# Altium footprint library custom-case.PcbLib: 483 footprints (part 2 of 31)
Each footprint in its own frame and in the unit in brackets; x right, y up, seen from the top. Pads: shape width x height; smd on the part's side, far side on the other; paste and mask are expansions set on the pad; w line width, h text height; cw(c..) or ccw(c..) is an arc to the next point about the centre after c.
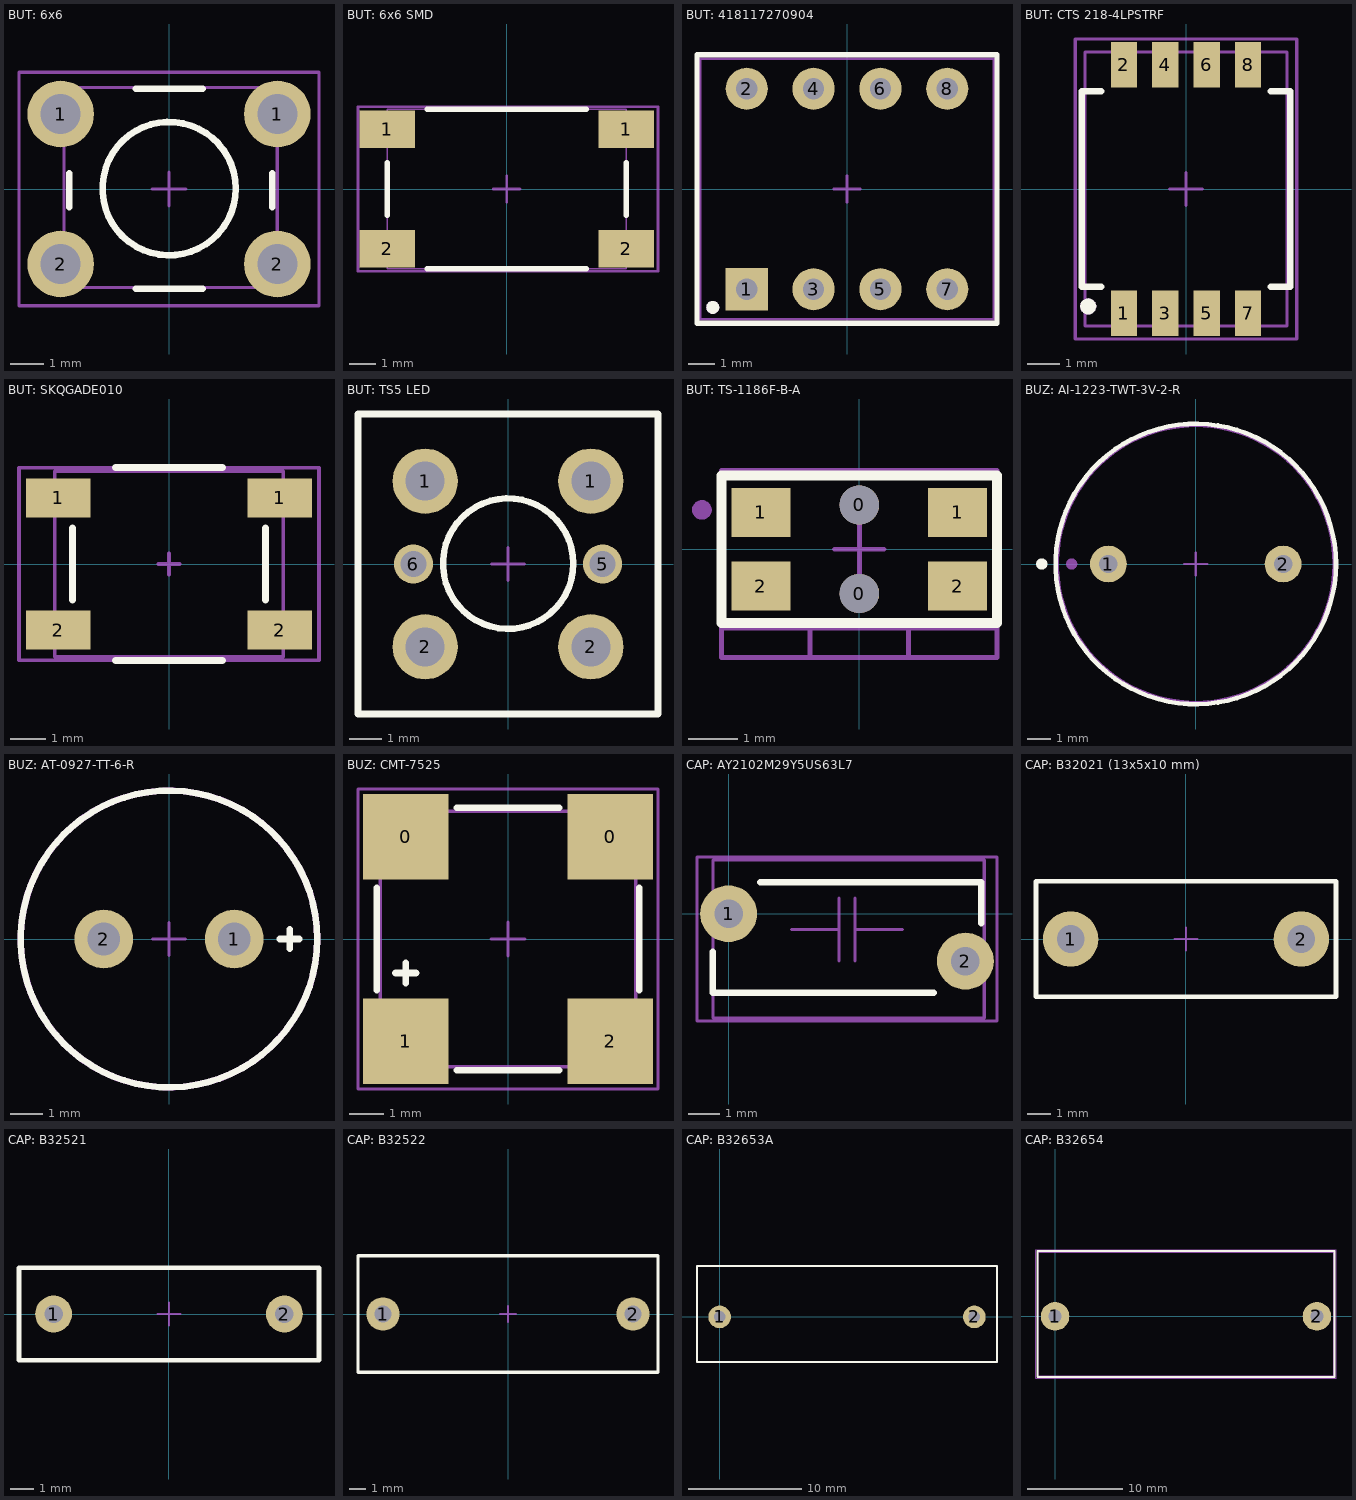
[diagram p1: the footprints below, top view; thin cyan lines are the x and y axes]

## BUT: 6x6 [mm] "Leaded Tactile Button 6x6"
height 5
pads (4):
  round 2 hole 1.2: 1(-3.25,2.25) 1(3.25,2.25) 2(-3.25,-2.25) 2(3.25,-2.25)
Top Overlay:
  circle w0.2: c0.004,0.012 r2
  lines w0.2: -2.996,-0.544 -2.996,0.472 ; -0.996,-2.988 1.004,-2.988 ; -0.996,3.012 1.004,3.012 ; 3.1,-0.544 3.1,0.472
Top Assy:
  lines w0.1: -3.148,-2.957 3.252,-2.957 3.252,3.043 -3.148,3.043 -3.148,-2.957
Size Area:
  lines w0.1: -0.5,0 0.5,0 ; 0,-0.5 0,0.5 ; -4.5,-3.5 -4.5,3.5 4.5,3.5 4.5,-3.5 -4.5,-3.5
3D body "������_��������_6�6�1.STEP": height 4.5, standoff -0.9, extent -3.148,-2.957 3.252,3.043

## BUT: 6x6 SMD [mm] "Leaded Tactile Button 6x6"
height 9
pads (4):
  rect 2.1x1.4 smd: 1(-4.5,2.25) 1(4.5,2.25) 2(-4.5,-2.25) 2(4.5,-2.25)
Top Overlay:
  lines w0.2: -4.5,-1 -4.5,1 ; -3,-3 3,-3 ; -3,3 3,3 ; 4.5,-1 4.5,1
Top Assy:
  lines w0.05: -4.5,-3 -4.5,3 4.5,3 4.5,-3 -4.5,-3
Size Area:
  lines w0.1: -0.5,0 0.5,0 ; 0,-0.5 0,0.5 ; -5.6,-3.1 5.7,-3.1 5.7,3.1 -5.6,3.1 -5.6,-3.1
3D body "User Library-PTS645SL43SMTR92-LFS.STEP": height 4.3, standoff 0, extent -4.5,-3 4.5,3

## BUT: 418117270904 [mm]
pads (10):
  rect 1.6x1.6 hole 0.8: 1(-3.81,-3.81)
  round 1.6 hole 0.8: 2(-3.81,3.81) 3(-1.27,-3.81) 4(-1.27,3.81) 5(1.27,-3.81) 6(1.27,3.81) 7(3.81,-3.81) 8(3.81,3.81)
  round 0.5 on Mech1: ""(-5.1,-4.5)
  round 0.5 on Top Overlay: ""(-5.1,-4.5)
Top Overlay:
  lines w0.2: -5.7,-5.1 5.7,-5.1 5.7,5.1 -5.7,5.1 -5.7,-5.1
Top Assy:
  lines w0.1: -5.58,-4.95 5.58,-4.95 5.58,4.95 -5.58,4.95 -5.58,-4.95
Size Area:
  lines w0.1: -0.5,0 0.5,0 ; 0,-0.5 0,0.5 ; -5.7,-5.1 5.7,-5.1 5.7,5.1 -5.7,5.1 -5.7,-5.1
3D body "418117270904 (rev1).stp": height 6.9, standoff -3.65, extent -5.58,-4.95 5.58,4.95

## BUT: CTS 218-4LPSTRF [mm]
pads (10):
  rect 0.8x1.4 smd: 1(-1.905,-3.81) 2(-1.905,3.81) 3(-0.635,-3.81) 4(-0.635,3.81) 5(0.635,-3.81) 6(0.635,3.81) 7(1.905,-3.81) 8(1.905,3.81)
  round 0.5 on Mech1: ""(-3,-3.6)
  round 0.5 on Top Overlay: ""(-3,-3.6)
Top Overlay:
  lines w0.2: -2.6,-3 -3.2,-3 -3.2,3 -2.6,3 ; 2.6,-3 3.2,-3 3.2,3 2.6,3
Top Assy:
  lines w0.1: -3.1,-4.2 3.1,-4.2 3.1,4.2 -3.1,4.2 -3.1,-4.2
Size Area:
  lines w0.1: -0.5,0 0.5,0 ; 0,-0.5 0,0.5 ; -3.4,-4.6 -3.4,4.6 3.4,4.6 3.4,-4.6 -3.4,-4.6
3D body "CTS 218-4LPSTRF.STEP": height 2.66, standoff 0, extent -3.125,-4.22 3.125,4.22

## BUT: SKQGADE010 [mm]
pads (4):
  rect 1.8x1.1 smd: 1(-3.1,1.85) 1(3.1,1.85) 2(-3.1,-1.85) 2(3.1,-1.85)
Top Overlay:
  lines w0.2: -2.7,-1 -2.7,1 ; -1.5,-2.7 1.5,-2.7 ; -1.5,2.7 1.5,2.7 ; 2.7,-1 2.7,1
Top Assy:
  lines w0.1: -3.2,-2.6 3.2,-2.6 3.2,2.6 -3.2,2.6 -3.2,-2.6
Size Area:
  lines w0.1: -0.3,0 0.3,0 ; 0,-0.3 0,0.3 ; -4.2,-2.7 4.2,-2.7 4.2,2.7 -4.2,2.7 -4.2,-2.7
3D body "User Library-4x4_SMD_Switch.STEP": height 1.45, standoff -0.05, extent -3.2,-2.6 3.2,2.6

## BUT: TS5 LED [mm] "Tactile Button 9.2x9.2 with LED"
height 5
pads (6):
  round 2 hole 1.2: 1(-2.54,2.54) 1(2.54,2.54) 2(-2.54,-2.54) 2(2.54,-2.54)
  round 1.2 hole 0.8: 5(2.9,0) 6(-2.9,0)
Top Overlay:
  circle w0.2: c0.004,0.012 r2
  lines w0.2: -4.6,-4.6 4.6,-4.6 4.6,4.6 -4.6,4.6 -4.6,-4.6
Top Assy:
  lines w0.1: -4.6,-4.6 4.6,-4.6 4.6,4.6 -4.6,4.6 -4.6,-4.6
Size Area:
  lines w0.1: -0.5,0 0.5,0 ; 0,-0.5 0,0.5 ; -4.6,-4.6 -4.6,4.6 4.6,4.6 4.6,-4.6 -4.6,-4.6
3D body "TS5_Button.STEP": height 15.4, standoff -4.45, extent -4.6,-4.6 4.6,4.6

## BUT: TS-1186F-B-A [mm] "XKB Connectivity Side Tactile Button"
height 9
pads (6):
  round 0.8 hole 0.8 unplated: 0(0,-0.9) 0(0,0.9)
  rect 1.2x1 smd: 1(-2,0.75) 1(2,0.75) 2(-2,-0.75) 2(2,-0.75)
Top Overlay:
  lines w0.2: -2.8,-1.5 -2.8,1.5 2.8,1.5 2.8,-1.5 -2.8,-1.5
Top Assy:
  circle w0.2: c-3.2,0.8 r0.1
  lines w0.1: -1,-1.6 -1,-2.2 0,-2.2 1,-2.2 1,-1.6 ; -2.8,-1.6 2.8,-1.6 2.8,1.6 -2.8,1.6 -2.8,-1.6
Size Area:
  lines w0.1: -0.5,0 0.5,0 ; 0,-0.5 0,0.5 ; -2.8,-2.2 2.8,-2.2 2.8,1.6 -2.8,1.6 -2.8,-2.2
3D body "XKB Connectivity TS-1186F-B-A.STEP": height 1.35, standoff -0.5, extent -2.4,-2.15 2.4,1.45

## BUZ: AI-1223-TWT-3V-2-R [mm]
pads (4):
  round 1.6 hole 0.8: 1(-3.8,0) 2(3.8,0)
  round 0.5 on Top Overlay: ""(-6.7,0)
  round 0.5 on Mech1: ""(-5.4,0)
Top Overlay:
  circle w0.2: c0,0 r6.1
Top Assy:
  circle w0.1: c0,0 r6
Size Area:
  circle w0.1: c0,0 r6
  lines w0.1: -0.5,0 0.5,0 ; 0,-0.5 0,0.5
3D body "AI-1223-TWT-3V-2-R.STEP": height 7.55, standoff -2, extent -6,-6 6,6

## BUZ: AT-0927-TT-6-R [mm]
pads (2):
  round 1.8 hole 1: 1(2,0) 2(-2,0)
Top Overlay:
  circle w0.2: c0,0 r4.55
  lines w0.2: 3.4,0 4,0 ; 3.7,-0.3 3.7,0.3
Top Assy:
  circle w0.1: c0,0 r4.5
  lines w0.1: 3.4,0 4,0 ; 3.7,-0.3 3.7,0.3
Size Area:
  circle w0.1: c0,0 r4.6
  lines w0.1: -0.5,0 0.5,0 ; 0,-0.5 0,0.5
3D body "AT-0927-TT-6-R.STEP": height 4.52, standoff -2.5, extent -4.5,-4.5 4.5,4.5

## BUZ: CMT-7525 [mm]
pads (4):
  rect 2.5x2.5 smd: 0(-3,3) 0(3,3) 1(-3,-3) 2(3,-3)
Top Overlay:
  lines w0.2: -3.85,-1.5 -3.85,1.5 ; -3.3,-1 -2.7,-1 ; -3,-1.3 -3,-0.7 ; -1.5,-3.85 1.5,-3.85 ; -1.5,3.85 1.5,3.85 ; 3.85,-1.5 3.85,1.5
Top Assy:
  lines w0.1: -3.5,-3 -2.5,-3 ; -3,-3.5 -3,-2.5 ; -3.75,-3.75 3.75,-3.75 3.75,3.75 -3.75,3.75 -3.75,-3.75
Size Area:
  lines w0.1: -0.5,0 0.5,0 ; 0,-0.5 0,0.5 ; -4.4,-4.4 4.4,-4.4 4.4,4.4 -4.4,4.4 -4.4,-4.4
3D body "User Library-YX7525P.STEP": height 2.5, standoff -0.01, extent -3.75,-3.75 3.75,3.75

## CAP: AY2102M29Y5US63L7 [mm]
pads (2):
  round 1.8 hole 0.9: 1(0,0) 2(7.5,-1.5)
Top Overlay:
  lines w0.2: -0.497,-1.2 -0.497,-2.5 6.5,-2.5 ; 1,1 7.997,1 7.997,-0.3
Top Assy:
  lines w0.1: 2,-0.5 3.5,-0.5 ; 3.5,-1.5 3.5,0.5 ; 4,-1.5 4,0.5 ; 4,-0.5 5.5,-0.5 ; -0.497,-3.3 8.097,-3.3 8.097,1.7 -0.497,1.7 -0.497,-3.3
Size Area:
  lines w0.1: -1,-3.4 8.5,-3.4 8.5,1.8 -1,1.8 -1,-3.4
3D body "6666.STEP": height 10.75, standoff -1.75, extent -0.5,-3.3 8.1,1.7

## CAP: B32021 (13x5x10 mm) [mm]
pads (2):
  round 2.4 hole 1.2: 1(-5,0) 2(5,0)
Top Overlay:
  lines w0.2: -6.5,-2.5 -6.5,2.5 6.5,2.5 6.5,-2.5 -6.5,-2.5
Top Assy:
  lines w0.1: -6.5,-2.5 -6.5,2.5 6.5,2.5 6.5,-2.5 -6.5,-2.5
Size Area:
  lines w0.1: -0.5,0 0.5,0 ; 0,-0.5 0,0.5 ; -6.5,-2.5 6.5,-2.5 6.5,2.5 -6.5,2.5 -6.5,-2.5
3D body "CAPRR1000W60L1300T500H1100.STEP": height 10.7, standoff -2.75, extent -6.5,-2.5 6.5,2.5

## CAP: B32521 [mm]
pads (2):
  round 1.6 hole 0.8: 1(-5,0) 2(5,0)
Top Overlay:
  lines w0.2: -6.5,-2 -6.5,2 6.5,2 6.5,-2 -6.5,-2
Top Assy:
  lines w0.1: -6.5,-2 6.5,-2 6.5,2 -6.5,2 -6.5,-2
Size Area:
  lines w0.1: -0.5,0 0.5,0 ; 0,-0.5 0,0.5 ; -6.5,-2 6.5,-2 6.5,2 -6.5,2 -6.5,-2
3D body "B32521.STEP": height 9, standoff -3, extent -6.5,-2 6.5,2

## CAP: B32522 [mm]
pads (2):
  round 2 hole 1: 1(-7.5,0) 2(7.5,0)
Top Overlay:
  lines w0.2: -9,-3.5 -9,0 -9,3.5 9,3.5 9,-3.5 -9,-3.5
Top Assy:
  lines w0.1: -9,-3.5 -9,3.5 9,3.5 9,-3.5 -9,-3.5
Size Area:
  lines w0.1: -0.5,0 0.5,0 ; 0,-0.5 0,0.5 ; -9,-3.5 9,-3.5 9,3.5 -9,3.5 -9,-3.5
3D body "B32522.stp": height 12.51, standoff -4, extent -9,-3.5 9,3.5

## CAP: B32653A [mm]
pads (2):
  round 2 hole 1: 1(0,0) 2(22.5,0)
Top Overlay:
  lines w0.2: -2,-4 -2,4.5 24.5,4.5 24.5,-4 -2,-4
Top Assy:
  lines w0.1: -2,-4 -2,4.5 24.5,4.5 24.5,-4 -2,-4
Size Area:
  lines w0.1: -2,-4 -2,4.5 24.5,4.5 24.5,-4 -2,-4
3D body "6.STEP": height 16.5, standoff -2.5, extent -2,-4 24.5,4.5

## CAP: B32654 [mm]
pads (2):
  round 3 hole 1.4: 1(0,0) 2(27.5,0)
Top Overlay:
  lines w0.2: -1.85,-6.35 -1.85,6.85 29.35,6.85 29.35,-6.35 -1.85,-6.35
Top Assy:
  lines w0.1: -1.75,-6.25 -1.75,6.75 29.25,6.75 29.25,-6.25 -1.75,-6.25
Size Area:
  lines w0.1: -2,-6.5 29.5,-6.5 29.5,7 -2,7 -2,-6.5
3D body "User Library-Vishay_1uF-400V_MKT_373_STD_27_5pitch.STEP": height 23, standoff -3, extent -1.75,-6.25 29.25,6.75